# Altium schematic symbol library Mosfet.SchLib: 175 symbols (part 4 of 4)
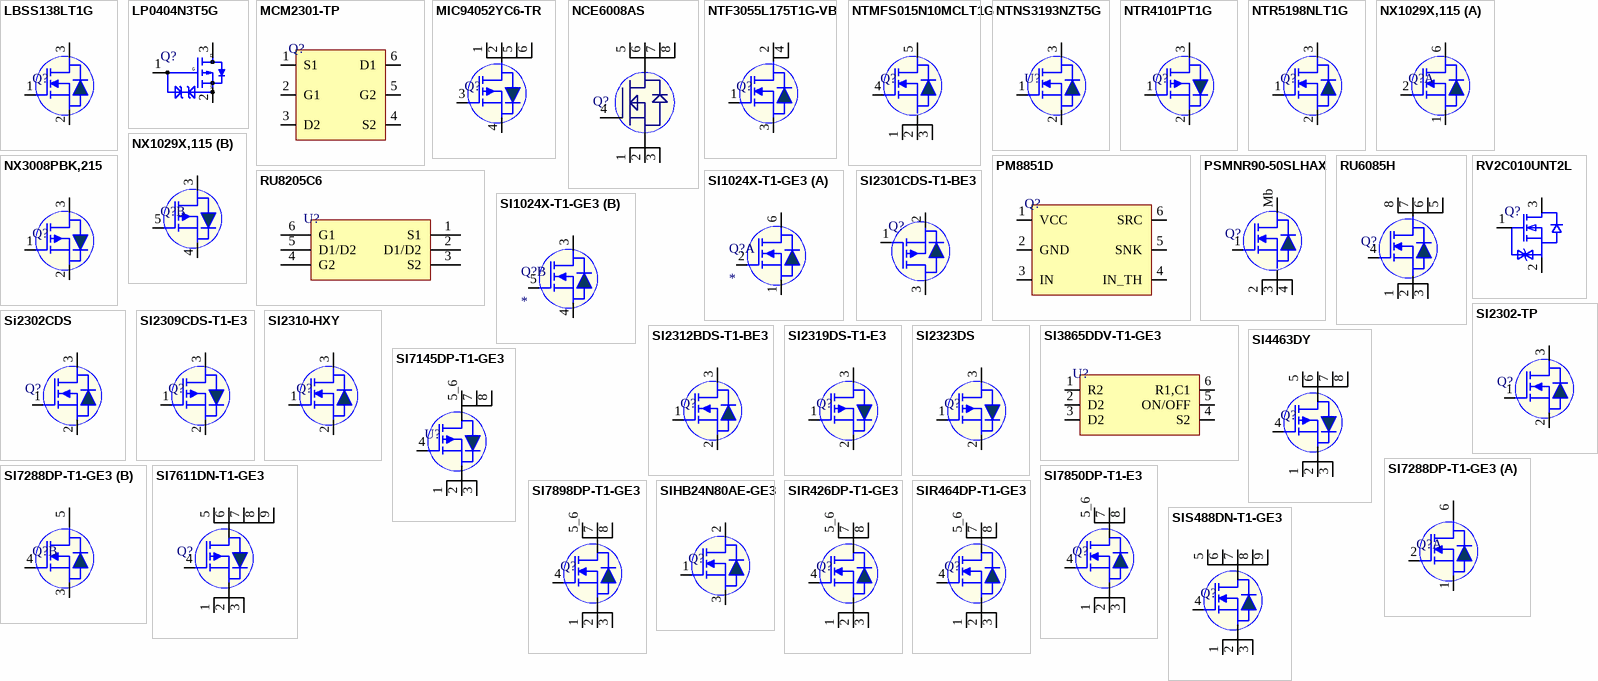
[diagram p7: symbols LBSS138LT1G to SIS488DN-T1-GE3]

## SI3865DDV-T1-GE3
designator U?
IC PWR SWITCH P-CHAN 1:1 6TSOP; Manufacturer: Vishay; Manufacturer Part Number: SI3865DDV-T1-GE3; Output Current: 1A; Number of Outputs: 1; Max Power Dissipation: 830mW; Max Supply Voltage: 12V; Min Supply Voltage: 1.5V; Interface: On/Off; Max Output Current: 2.8A; On-State Resistance: 165mR; Output Configuration: High Side; On-state Resistance-Max: 54mR; Supplier 1: Digi-Key; Stock 1: 54870; Pricing 1: 1=0.58, 10=0.494, 25=0.462, 100=0.3432, 500=0.26796, 1000=0.2178 (USD); Mount: Surface Mount; Case/Package: TSOP; Number of Pins: 6; Weight: 0.000705oz; Min Operating Temperature: -55°C; Max Operating Temperature: 150°C; Packaging: Tape and Reel; Package Quantity: 3000; Power Dissipation: 830mW; Current Rating: 2.8A; Series: TrenchFET®; Rated Current-Max: 2.8A; Length: 3.1mm; Width: 1.7mm; Height: 1mm; Radiation Hardening: No; REACH SVHC: No SVHC; Lead Free: Lead Free; RoHS Compliant: Yes; ComponentLink1URL: http://www.mouser.com/ds/2/427/si3865ddv-256526.pdf?src-supplier=Mouser; ComponentLink1Description: http://www.mouser.com/ds/2/427/si3865ddv-256526.pdf?src-supplier=Mouser; ComponentLink2URL: http://www.vishay.com/docs/67998/si3865ddv.pdf?src-supplier=Avnet; ComponentLink2Description: http://www.vishay.com/docs/67998/si3865ddv.pdf?src-supplier=Avnet; ComponentLink3URL: https://www.verical.com/server-webapp/html/getDatasheet?partID=710254&src-supplier=Verical; ComponentLink3Description: https://www.verical.com/server-webapp/html/getDatasheet?partID=710254&src-supplier=Verical; ComponentLink4URL: https://media.digikey.com/pdf/Data%20Sheets/Vishay%20Siliconix%20PDFs/Si3865DDV.pdf?src-supplier=Digi-Key; ComponentLink4Description: https://media.digikey.com/pdf/Data%20Sheets/Vishay%20Siliconix%20PDFs/Si3865DDV.pdf?src-supplier=Digi-Key; Supplier Part Number 1: SI3865DDV-T1-GE3CT-ND; LCSC Part Number: C141534; Item Type: IC
footprint 6-TSOP_
pins: 1 R2, 2 D2, 3 D2, 4 S2, 5 ON/OFF, 6 R1,C1

## SI4463DY
designator Q?
20V 11.5A 12mΩ@11.5A,4.5V 1W 1.5V@250uA 1PCSPChannel SOIC-8 MOSFETs ROHS; Manufacturer: ON Semiconductor / Fairchild; Manufacturer Part Number: SI4463DY; Rise Time: 15ns; Fall Time: 60ns; Turn-Off Delay Time: 120ns; Continuous Drain Current (ID): -11.5A; Gate to Source Voltage (Vgs): 12V; Drain to Source Resistance: 10mR; Polarity: P-CHANNEL; Power Dissipation: 2.5W; Drain to Source Breakdown Voltage: -20V; Supplier: Farnell; LCSC Part Number: C3279922; RoHS: Yes; Item Type: MOSFETs; Stock: 188616; Pricing: 472=0.62 (GBP); Case/Package: SOIC; Pins: 8; Min Operating Temperature: -55°C; Max Operating Temperature: 150°C; Package Quantity: 2500; Packaging: Tape and Reel; RoHS Compliant: Yes; ComponentLink1URL: http://components.arrow.com/part/dataview/3004105S7561270N7769?src-supplier=Arrow+Electronics; ComponentLink1Description: http://components.arrow.com/part/dataview/3004105S7561270N7769?src-supplier=Arrow+Electronics
footprint SOIC-8
pins: 1 S, 2 S, 3 S, 4 G, 5 D, 6 D, 7 D, 8 D

## SI7145DP-T1-GE3
designator U?
MOSFET P-CH 30V 60A PPAK SO-8; Manufacturer: Vishay Siliconix; Manufacturer Part Number: SI7145DP-T1-GE3; Supplier: Mouser; LCSC Part Number: C144873; RoHS: Yes; Item Type: MOSFET; Stock: 108048; Pricing: 1=1.84, 10=1.58, 50=1.58, 100=1.32, 1000=1.04, 10000=0.956 (USD); ComponentLink1URL: https://datasheet.ciiva.com/4441/si7145dp-223652-4441979.pdf?src-supplier=Mouser; ComponentLink1Description: https://datasheet.ciiva.com/4441/si7145dp-223652-4441979.pdf?src-supplier=Mouser; ComponentLink2URL: https://datasheet.ciiva.com/6367/si7145dp-6367329.pdf?src-supplier=Digikey; ComponentLink2Description: https://datasheet.ciiva.com/6367/si7145dp-6367329.pdf?src-supplier=Digikey; ComponentLink3URL: https://datasheet.ciiva.com/28599/1913296-28599670.pdf?src-supplier=Element14; ComponentLink3Description: https://datasheet.ciiva.com/28599/1913296-28599670.pdf?src-supplier=Element14; ComponentLink4URL: https://datasheet.ciiva.com/22671/1913296-22671737.pdf?src-supplier=Element14; ComponentLink4Description: https://datasheet.ciiva.com/22671/1913296-22671737.pdf?src-supplier=Element14
footprint PowerPAK-SO-8
pins: 1 S, 2 S, 3 S, 4 G, 5_6 D, 7 D, 8 D

## SI7288DP-T1-GE3
designator Q?
MOSFET 2N-CH 40V 20A PPAK SO8; Manufacturer: Vishay Siliconix; Manufacturer Part Number: SI7288DP-T1-GE3; Item Type: MOSFETs; Supplier: Arrow Electronics; LCSC Part Number: C126988; RoHS: Yes; Stock: 18000; Pricing: 3000=0.5368 (USD); ComponentLink1URL: https://datasheet.ciiva.com/1253/si7288dp-1253714.pdf?src-supplier=Newark; ComponentLink1Description: https://datasheet.ciiva.com/1253/si7288dp-1253714.pdf?src-supplier=Newark; ComponentLink2URL: https://datasheet.ciiva.com/4442/si7288dp-244449-4442467.pdf?src-supplier=Mouser; ComponentLink2Description: https://datasheet.ciiva.com/4442/si7288dp-244449-4442467.pdf?src-supplier=Mouser; ComponentLink3URL: https://datasheet.ciiva.com/11161/si7288dp-11161495.pdf?src-supplier=Avnet; ComponentLink3Description: https://datasheet.ciiva.com/11161/si7288dp-11161495.pdf?src-supplier=Avnet; ComponentLink4URL: https://datasheet.ciiva.com/928/si7288dp-928419.pdf?src-supplier=Digikey; ComponentLink4Description: https://datasheet.ciiva.com/928/si7288dp-928419.pdf?src-supplier=Digikey; ComponentLink5URL: https://datasheet.ciiva.com/928/si7288dp-928420.pdf?src-supplier=Digikey; ComponentLink5Description: https://datasheet.ciiva.com/928/si7288dp-928420.pdf?src-supplier=Digikey; ComponentLink6URL: https://datasheet.ciiva.com/928/si7288dp-928421.pdf?src-supplier=Digikey; ComponentLink6Description: https://datasheet.ciiva.com/928/si7288dp-928421.pdf?src-supplier=Digikey; ComponentLink7URL: https://datasheet.ciiva.com/16287/si7288dp-16287085.pdf?src-supplier=Future+Electronics; ComponentLink7Description: https://datasheet.ciiva.com/16287/si7288dp-16287085.pdf?src-supplier=Future+Electronics
footprint PowerPAK® SO-8 Dual
part A pins: 1 S, 2 G, 6 D
part B pins: 3 S, 4 G, 5 D

## SI7611DN-T1-GE3
designator Q?
MOSFET P-CH 40V 18A PPAK1212-8; Manufacturer: Vishay Siliconix; Manufacturer Part Number: SI7611DN-T1-GE3; Rds On Max: 25mR; Input Capacitance: 1.98nF; Nominal Vgs: -3V; Rise Time: 11ns; Drain to Source Voltage (Vdss): -40V; Continuous Drain Current (ID): 9.3A; Max Power Dissipation: 39W; Gate to Source Voltage (Vgs): 20V; Fall Time: 9ns; Turn-Off Delay Time: 30ns; Number of Elements: 1; Power Dissipation: 3.7W; Turn-On Delay Time: 10ns; Polarity: P-CHANNEL; Supplier 1: Avnet; RoHS: Yes; Category: MOSFETs; Pricing 1: 3000=0.96116 (USD); Mount: Surface Mount; Number of Pins: 8; Min Operating Temperature: -50°C; Max Operating Temperature: 150°C; Package Quantity: 3000; Packaging: Tape and Reel; Drain to Source Resistance: 25mR; Threshold Voltage: -3V; Drain to Source Breakdown Voltage: -40V; Number of Channels: 1; On-State Resistance: 25mR; Series: TrenchFET®; Drain-source On Resistance-Max: 25mR; Length: 3.05mm; Width: 3.05mm; Height: 1.04mm; Radiation Hardening: No; Lead Free: Lead Free; RoHS Compliant: Yes; ComponentLink1URL: https://datasheet.ciiva.com/16217/si7611dn-16217425.pdf?src-supplier=Future+Electronics; ComponentLink1Description: https://datasheet.ciiva.com/16217/si7611dn-16217425.pdf?src-supplier=Future+Electronics; ComponentLink2URL: https://datasheet.ciiva.com/22652/1719651-22652413.pdf?src-supplier=Element14; ComponentLink2Description: https://datasheet.ciiva.com/22652/1719651-22652413.pdf?src-supplier=Element14; ComponentLink3URL: https://datasheet.ciiva.com/4441/si7611dn-244617-4441134.pdf?src-supplier=Mouser; ComponentLink3Description: https://datasheet.ciiva.com/4441/si7611dn-244617-4441134.pdf?src-supplier=Mouser; ComponentLink4URL: https://datasheet.ciiva.com/933/si7611dn-933572.pdf?src-supplier=Digi-Key; ComponentLink4Description: https://datasheet.ciiva.com/933/si7611dn-933572.pdf?src-supplier=Digi-Key; ComponentLink5URL: https://datasheet.ciiva.com/933/si7611dn-933573.pdf?src-supplier=Digi-Key; ComponentLink5Description: https://datasheet.ciiva.com/933/si7611dn-933573.pdf?src-supplier=Digi-Key; ComponentLink6URL: https://datasheet.ciiva.com/933/si7611dn-933574.pdf?src-supplier=Digi-Key; ComponentLink6Description: https://datasheet.ciiva.com/933/si7611dn-933574.pdf?src-supplier=Digi-Key; ComponentLink7URL: https://datasheet.ciiva.com/11159/si7611dn-11159816.pdf?src-supplier=Avnet; ComponentLink7Description: https://datasheet.ciiva.com/11159/si7611dn-11159816.pdf?src-supplier=Avnet; ComponentLink8URL: https://datasheet.ciiva.com/22671/si7611dn-22671641.pdf?src-supplier=Element14; ComponentLink8Description: https://datasheet.ciiva.com/22671/si7611dn-22671641.pdf?src-supplier=Element14; Supplier Part Number 1: SI7611DN-T1-GE3; LCSC Part Number: C506599; Item Type: Mosfet
footprint PowerPAK® 1212-8
pins: 1 S, 2 S, 3 S, 4 G, 5 D, 6 D, 7 D, 8 D, 9 D

## SI7850DP-T1-E3
designator Q?
MOSFETs 60V Vds 20V Vgs PowerPAK SO-8; Manufacturer: Vishay Siliconix; Manufacturer Part Number: SI7850DP-T1-E3; Supplier: Mouser; Supplier Part Number: 781-SI7850DP-E3; RoHS: Yes; Item Type: MOSFETs; Stock: 6748; Pricing: 1=1.66, 10=1.41, 50=1.41, 100=1.16, 1000=0.884, 10000=0.806 (USD); ComponentLink1URL: https://datasheet.ciiva.com/5769/71625-5769366.pdf?src-supplier=Farnell; ComponentLink1Description: https://datasheet.ciiva.com/5769/71625-5769366.pdf?src-supplier=Farnell; ComponentLink2URL: https://datasheet.ciiva.com/11161/71625-11161336.pdf?src-supplier=Avnet; ComponentLink2Description: https://datasheet.ciiva.com/11161/71625-11161336.pdf?src-supplier=Avnet; ComponentLink3URL: https://datasheet.ciiva.com/11161/71625-11161551.pdf?src-supplier=Avnet; ComponentLink3Description: https://datasheet.ciiva.com/11161/71625-11161551.pdf?src-supplier=Avnet; ComponentLink4URL: https://datasheet.ciiva.com/28603/1866538-28603533.pdf?src-supplier=Element14; ComponentLink4Description: https://datasheet.ciiva.com/28603/1866538-28603533.pdf?src-supplier=Element14; ComponentLink5URL: https://datasheet.ciiva.com/933/71625-933467.pdf?src-supplier=Digikey; ComponentLink5Description: https://datasheet.ciiva.com/933/71625-933467.pdf?src-supplier=Digikey; ComponentLink6URL: https://datasheet.ciiva.com/933/71625-933468.pdf?src-supplier=Digikey; ComponentLink6Description: https://datasheet.ciiva.com/933/71625-933468.pdf?src-supplier=Digikey; ComponentLink7URL: https://datasheet.ciiva.com/933/71625-933469.pdf?src-supplier=Digikey; ComponentLink7Description: https://datasheet.ciiva.com/933/71625-933469.pdf?src-supplier=Digikey; ComponentLink8URL: https://datasheet.ciiva.com/7710/1866538-7710299.pdf?src-supplier=Element14; ComponentLink8Description: https://datasheet.ciiva.com/7710/1866538-7710299.pdf?src-supplier=Element14
footprint PowerPAK-SO-8
pins: 1 S, 2 S, 3 S, 4 G, 5_6 D, 7 D, 8 D

## SI7898DP-T1-GE3
designator Q?
MOSFET N-CH 150V 3A PPAK SO-8; Manufacturer: Vishay Siliconix; Manufacturer Part Number: SI7898DP-T1-GE3; Item Type: MOSFETs; Supplier: Mouser; LCSC Part Number: C26291; RoHS: Yes; Stock: 9107; Pricing: 1=2.15, 10=1.77, 50=1.77, 100=1.42, 1000=1.02, 10000=0.909 (USD); ComponentLink1URL: https://datasheet.ciiva.com/5769/50990-5769376.pdf?src-supplier=Farnell; ComponentLink1Description: https://datasheet.ciiva.com/5769/50990-5769376.pdf?src-supplier=Farnell; ComponentLink2URL: https://datasheet.ciiva.com/7313/71873-7313920.pdf?src-supplier=Newark; ComponentLink2Description: https://datasheet.ciiva.com/7313/71873-7313920.pdf?src-supplier=Newark; ComponentLink3URL: https://datasheet.ciiva.com/16486/71873-16486686.pdf?src-supplier=Future+Electronics; ComponentLink3Description: https://datasheet.ciiva.com/16486/71873-16486686.pdf?src-supplier=Future+Electronics; ComponentLink4URL: https://datasheet.ciiva.com/6386/71873-6386508.pdf?src-supplier=Digikey; ComponentLink4Description: https://datasheet.ciiva.com/6386/71873-6386508.pdf?src-supplier=Digikey; ComponentLink5URL: https://datasheet.ciiva.com/6386/71873-6386511.pdf?src-supplier=Digikey; ComponentLink5Description: https://datasheet.ciiva.com/6386/71873-6386511.pdf?src-supplier=Digikey; ComponentLink6URL: https://datasheet.ciiva.com/22661/50990-22661750.pdf?src-supplier=Farnell; ComponentLink6Description: https://datasheet.ciiva.com/22661/50990-22661750.pdf?src-supplier=Farnell; ComponentLink7URL: https://datasheet.ciiva.com/11159/71873-11159627.pdf?src-supplier=Avnet; ComponentLink7Description: https://datasheet.ciiva.com/11159/71873-11159627.pdf?src-supplier=Avnet; ComponentLink8URL: https://datasheet.ciiva.com/8059/71873-8059181.pdf?src-supplier=Element14; ComponentLink8Description: https://datasheet.ciiva.com/8059/71873-8059181.pdf?src-supplier=Element14; ComponentLink9URL: https://datasheet.ciiva.com/28671/1911754-28671659.pdf?src-supplier=Element14; ComponentLink9Description: https://datasheet.ciiva.com/28671/1911754-28671659.pdf?src-supplier=Element14; ComponentLink10URL: https://datasheet.ciiva.com/22695/1911754-22695978.pdf?src-supplier=Element14; ComponentLink10Description: https://datasheet.ciiva.com/22695/1911754-22695978.pdf?src-supplier=Element14
footprint PowerPAK-SO-8
pins: 1 S, 2 S, 3 S, 4 G, 5_6 D, 7 D, 8 D

## SIHB24N80AE-GE3
designator Q?
MOSFET N-CH 800V 21A D2PAK; Manufacturer: Vishay; Manufacturer Part Number: SIHB24N80AE-GE3; Supplier: Mouser; LCSC Part Number: C3277647; RoHS: No; Item Type: MOSFET; Stock: 457; Pricing: 1=3.16, 10=2.93, 50=2.71, 100=2.32, 1000=1.66, 10000=1.59 (USD)
footprint TO-263
pins: 1 G, 2 D, 3 S

## SIR426DP-T1-GE3
designator Q?
MOSFET N-CH 40V 30A PPAK SO-8; Manufacturer: Vishay; Manufacturer Part Number: SIR426DP-T1-GE3; Item Type: MOSFETs; Supplier: Mouser; LCSC Part Number: C52893; RoHS: Yes; Stock: 68474; Pricing: 1=1, 10=0.818, 50=0.818, 100=0.637, 1000=0.44, 10000=0.375 (USD); Height: 1.12mm; Lead Free: 5697LeadFree; ComponentLink1URL: https://datasheet.ciiva.com/6387/sir426dp-6387168.pdf?src-supplier=Digikey; ComponentLink1Description: https://datasheet.ciiva.com/6387/sir426dp-6387168.pdf?src-supplier=Digikey; ComponentLink2URL: https://datasheet.ciiva.com/4440/sir426dp-244407-4440641.pdf?src-supplier=Mouser; ComponentLink2Description: https://datasheet.ciiva.com/4440/sir426dp-244407-4440641.pdf?src-supplier=Mouser; ComponentLink3URL: https://datasheet.ciiva.com/28599/1750667-28599683.pdf?src-supplier=Element14; ComponentLink3Description: https://datasheet.ciiva.com/28599/1750667-28599683.pdf?src-supplier=Element14; ComponentLink4URL: https://datasheet.ciiva.com/5774/sir426dp-5774022.pdf?src-supplier=Farnell; ComponentLink4Description: https://datasheet.ciiva.com/5774/sir426dp-5774022.pdf?src-supplier=Farnell; ComponentLink5URL: https://datasheet.ciiva.com/6387/sir426dp-6387166.pdf?src-supplier=Digikey; ComponentLink5Description: https://datasheet.ciiva.com/6387/sir426dp-6387166.pdf?src-supplier=Digikey; ComponentLink6URL: https://datasheet.ciiva.com/11159/sir426dp-11159834.pdf?src-supplier=Avnet; ComponentLink6Description: https://datasheet.ciiva.com/11159/sir426dp-11159834.pdf?src-supplier=Avnet; ComponentLink7URL: https://datasheet.ciiva.com/16486/sir426dp-16486778.pdf?src-supplier=Future+Electronics; ComponentLink7Description: https://datasheet.ciiva.com/16486/sir426dp-16486778.pdf?src-supplier=Future+Electronics
footprint PowerPAK-SO-8
pins: 1 S, 2 S, 3 S, 4 G, 5_6 D, 7 D, 8 D

## SIR464DP-T1-GE3
designator Q?
MOSFET N-CH 30V 50A PPAK SO-8; Manufacturer: Vishay Siliconix; Manufacturer Part Number: SIR464DP-T1-GE3; Item Type: MOSFETs; Supplier: Mouser; LCSC Part Number: C469518; RoHS: Yes; Stock: 4057; Pricing: 1=1.37, 10=1.12, 50=1.12, 100=0.87, 1000=0.601, 10000=0.513 (USD); ComponentLink1URL: https://datasheet.ciiva.com/22707/1758799-22707817.pdf?src-supplier=Element14; ComponentLink1Description: https://datasheet.ciiva.com/22707/1758799-22707817.pdf?src-supplier=Element14; ComponentLink2URL: https://datasheet.ciiva.com/7313/sir464dp-7313971.pdf?src-supplier=Newark; ComponentLink2Description: https://datasheet.ciiva.com/7313/sir464dp-7313971.pdf?src-supplier=Newark; ComponentLink3URL: https://datasheet.ciiva.com/4438/sir464dp-244563-4438539.pdf?src-supplier=Mouser; ComponentLink3Description: https://datasheet.ciiva.com/4438/sir464dp-244563-4438539.pdf?src-supplier=Mouser; ComponentLink4URL: https://datasheet.ciiva.com/8059/sir464dp-8059190.pdf?src-supplier=Element14; ComponentLink4Description: https://datasheet.ciiva.com/8059/sir464dp-8059190.pdf?src-supplier=Element14; ComponentLink5URL: https://datasheet.ciiva.com/11159/sir464dp-11159853.pdf?src-supplier=Avnet; ComponentLink5Description: https://datasheet.ciiva.com/11159/sir464dp-11159853.pdf?src-supplier=Avnet; ComponentLink6URL: https://datasheet.ciiva.com/933/sir464dp-933254.pdf?src-supplier=Digikey; ComponentLink6Description: https://datasheet.ciiva.com/933/sir464dp-933254.pdf?src-supplier=Digikey; ComponentLink7URL: https://datasheet.ciiva.com/933/sir464dp-933255.pdf?src-supplier=Digikey; ComponentLink7Description: https://datasheet.ciiva.com/933/sir464dp-933255.pdf?src-supplier=Digikey; ComponentLink8URL: https://datasheet.ciiva.com/933/sir464dp-933256.pdf?src-supplier=Digikey; ComponentLink8Description: https://datasheet.ciiva.com/933/sir464dp-933256.pdf?src-supplier=Digikey; ComponentLink9URL: https://datasheet.ciiva.com/16287/sir464dp-16287369.pdf?src-supplier=Future+Electronics; ComponentLink9Description: https://datasheet.ciiva.com/16287/sir464dp-16287369.pdf?src-supplier=Future+Electronics
footprint PowerPAK-SO-8
pins: 1 S, 2 S, 3 S, 4 G, 5_6 D, 7 D, 8 D

## SIS488DN-T1-GE3
designator Q?
MOSFET N-CH 40V 40A PPAK1212-8; Manufacturer: Vishay Semiconductors; Manufacturer Part Number: SIS488DN-T1-GE3; Item Type: MOSFETs; Supplier: Arrow Electronics; LCSC Part Number: C511037; RoHS: Yes; Stock: 2575; Pricing: 1=1.0926, 10=1.0325, 25=0.9922, 50=0.9525, 100=0.9137, 250=0.9045, 500=0.8952, 1000=0.8863 (USD); ComponentLink1URL: https://datasheet.ciiva.com/24101/sis488dn-267694-24101036.pdf?src-supplier=Mouser; ComponentLink1Description: https://datasheet.ciiva.com/24101/sis488dn-267694-24101036.pdf?src-supplier=Mouser; ComponentLink2URL: https://datasheet.ciiva.com/29742/sis488dn-29742161.pdf?src-supplier=Digikey; ComponentLink2Description: https://datasheet.ciiva.com/29742/sis488dn-29742161.pdf?src-supplier=Digikey
footprint PowerPAK® 1212-8
pins: 1 S, 2 S, 3 S, 4 G, 5 D, 6 D, 7 D, 8 D, 9 D

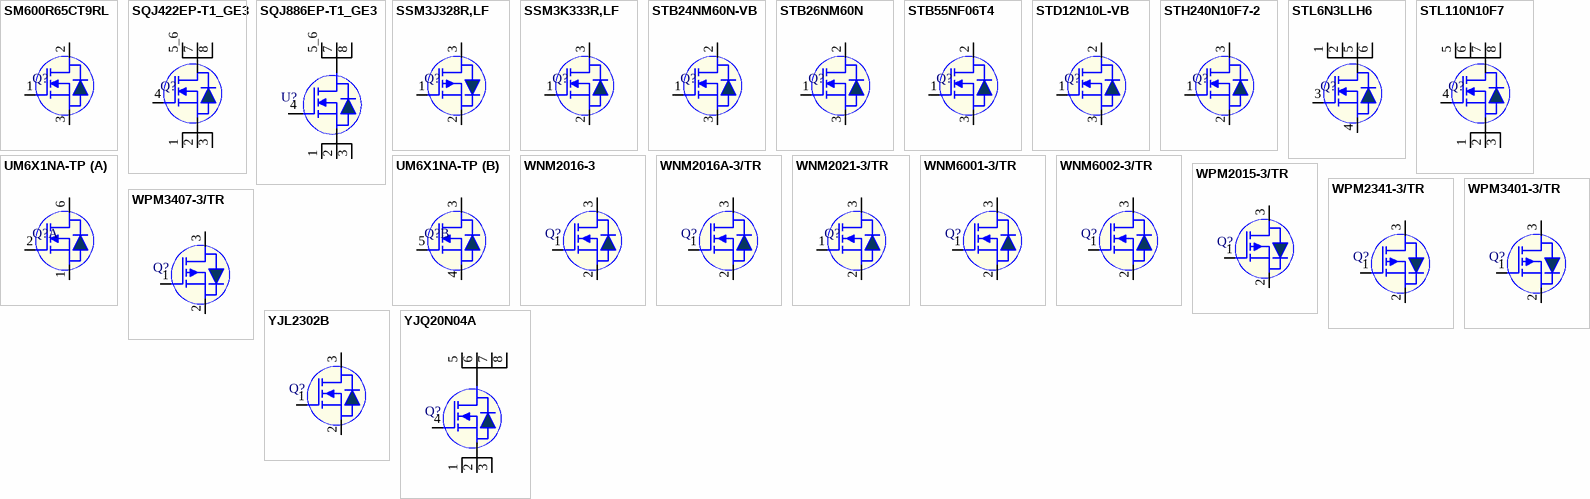
[diagram p4: symbols SM600R65CT9RL to YJQ20N04A]

## SM600R65CT9RL
designator Q?
650V 7A 0.6Ω@10V,3.5A 63W 4V 1 N-channel TO-252-2 MOSFETs ROHS; Manufacturer: SPS; Manufacturer Part Number: SM600R65CT9RL; Item Type: Mosfet; Package: TO-252-2; LCSC Part Number: C509119; ComponentLink1Description: LCSC; ComponentLink1URL: https://www.lcsc.com/product-detail/MOSFETs_SPS-SM600R65CT9RL_C509119.html?s_z=n_TK7P65W
footprint TO-252-2L
pins: 1 G, 2 D, 3 S

## SQJ422EP-T1_GE3
designator Q?
MOSFET N-CH 40V 74A PPAK SO-8; Manufacturer: Vishay; Manufacturer Part Number: SQJ422EP-T1_GE3; Rds On Max: 3.4mR; Input Capacitance: 4.66nF; Rise Time: 10ns; Continuous Drain Current (ID): 75A; Max Power Dissipation: 83W; Threshold Voltage: 2V; Turn-On Delay Time: 13ns; Turn-Off Delay Time: 29ns; Fall Time: 8ns; Gate to Source Voltage (Vgs): 20V; Number of Channels: 1; Polarity: N-CHANNEL; Item Type: IC; Supplier: Mouser; Supplier Part Number: 781-SQJ422EP-T1_GE3; RoHS: Yes; Category: MOSFETs; Stock: 4213; Pricing: 1=1.62, 10=1.34, 50=1.34, 100=1.08, 1000=0.763, 10000=0.68 (USD); Mounting Technology: Surface Mount; Pins: 6; Min Operating Temperature: -55°C; Max Operating Temperature: 175°C; Packaging: Tape and Reel; Package Quantity: 3000; Drain to Source Voltage (Vdss): 40V; Drain to Source Resistance: 3.4mR; Series: TrenchFET®; Reach SVHC Compliant: Unknown; ComponentLink1URL: https://datasheet.ciiva.com/28599/1760635-28599505.pdf?src-supplier=Element14; ComponentLink1Description: https://datasheet.ciiva.com/28599/1760635-28599505.pdf?src-supplier=Element14; ComponentLink2URL: https://datasheet.ciiva.com/29745/sqj422ep-29745736.pdf?src-supplier=Digikey; ComponentLink2Description: https://datasheet.ciiva.com/29745/sqj422ep-29745736.pdf?src-supplier=Digikey; LCSC Part Number: C142542
footprint PowerPAK-SO-8
pins: 1 S, 2 S, 3 S, 4 G, 5_6 D, 7 D, 8 D

## SQJ886EP-T1_GE3
designator U?
MOSFET N-CH 40V 60A PPAK SO-8; Manufacturer: Vishay Siliconix; Manufacturer Part Number: SQJ886EP-T1_GE3; Item Type: IC; Supplier: Mouser; Supplier Part Number: 781-SQJ886EP-T1_GE3; RoHS: Yes; Category: MOSFETs; Stock: 59592; Pricing: 1=1.5, 10=1.24, 50=1.24, 100=0.959, 1000=0.662, 10000=0.565 (USD); ComponentLink1URL: https://datasheet.ciiva.com/28599/1760631-28599527.pdf?src-supplier=Element14; ComponentLink1Description: https://datasheet.ciiva.com/28599/1760631-28599527.pdf?src-supplier=Element14; ComponentLink2URL: https://datasheet.ciiva.com/30021/sqj886ep-30021665.pdf?src-supplier=Avnet; ComponentLink2Description: https://datasheet.ciiva.com/30021/sqj886ep-30021665.pdf?src-supplier=Avnet; LCSC Part Number: C727822
footprint PowerPAK-SO-8
pins: 1 S, 2 S, 3 S, 4 G, 5_6 D, 7 D, 8 D

## SSM3J328R,LF
designator Q?
MOSFET P-CH 20V 6A SOT23F; Manufacturer: Toshiba; Manufacturer Part Number: SSM3J328R,LF; Item Type: MOSFETs; Rds On Max: 29.8mR; Input Capacitance: 840pF; Max Power Dissipation: 1W; Gate to Source Voltage (Vgs): 8V; Turn-Off Delay Time: 107ns; Turn-On Delay Time: 32ns; Number of Channels: 1; Drain to Source Resistance: 47.4mR; Polarity: P-CHANNEL; Supplier: Digikey; LCSC Part Number: C396016; RoHS: Yes; Stock: 582786; Pricing: 1=0.41, 10=0.252, 100=0.1588, 500=0.11846, 1000=0.10542 (USD); Mounting Technology: Surface Mount; Case/Package: SOT-23-3; Min Operating Temperature: -55°C; Max Operating Temperature: 150°C; Continuous Drain Current (ID): 6A; Package Quantity: 3000; Packaging: Tape and Reel; Drain to Source Voltage (Vdss): 20V; Radiation Hardening: No; RoHS Compliant: Yes; ComponentLink1URL: https://datasheet.ciiva.com/11158/ssm3j328r-datasheet-en-20140301-11158652.pdf?src-supplier=Avnet; ComponentLink1Description: https://datasheet.ciiva.com/11158/ssm3j328r-datasheet-en-20140301-11158652.pdf?src-supplier=Avnet; ComponentLink2URL: https://datasheet.ciiva.com/24106/ssm3j328r-datasheet-en-20140301-24106699.pdf?src-supplier=Mouser; ComponentLink2Description: https://datasheet.ciiva.com/24106/ssm3j328r-datasheet-en-20140301-24106699.pdf?src-supplier=Mouser; ComponentLink3URL: https://datasheet.ciiva.com/45425/ssm3j328r-datasheet-en-20140301-45425519.pdf?src-supplier=Digikey; ComponentLink3Description: https://datasheet.ciiva.com/45425/ssm3j328r-datasheet-en-20140301-45425519.pdf?src-supplier=Digikey; ComponentLink4URL: https://datasheet.ciiva.com/45425/ssm3j328r-datasheet-en-20140301-45425813.pdf?src-supplier=Digikey; ComponentLink4Description: https://datasheet.ciiva.com/45425/ssm3j328r-datasheet-en-20140301-45425813.pdf?src-supplier=Digikey
footprint SOT-23F
pins: 1 G, 2 S, 3 D

## SSM3K333R,LF
designator Q?
MOSFET N CH 30V 6A 2-3Z1A; Manufacturer: Toshiba; Manufacturer Part Number: SSM3K333R,LF; Rds On Max: 28mR; Input Capacitance: 436pF; Max Power Dissipation: 1W; Gate to Source Voltage (Vgs): 20V; Drain to Source Resistance: 42mR; Polarity: N-CHANNEL; Supplier: Digikey; Supplier Part Number: SSM3K333RLFCT-ND; RoHS: Yes; Category: MOSFETs; Stock: 53698; Pricing: 1=0.42, 10=0.299, 100=0.1506, 500=0.13348, 1000=0.10388 (USD); Mounting Technology: Surface Mount; Case/Package: SOT-23-3; Continuous Drain Current (ID): 6A; Drain to Source Voltage (Vdss): 30V; Packaging: Tape and Reel; Drain to Source Breakdown Voltage: 30V; Power Dissipation: 1W; Series: -; RoHS Compliant: Yes; ComponentLink1URL: https://datasheet.ciiva.com/6385/ssm3k333r-datasheet-en-20140301-6385191.pdf?src-supplier=Digikey; ComponentLink1Description: https://datasheet.ciiva.com/6385/ssm3k333r-datasheet-en-20140301-6385191.pdf?src-supplier=Digikey
footprint SOT-23F
pins: 1 G, 2 S, 3 D

## STB24NM60N-VB
designator Q?
650V 190mΩ@10V 3.5V 1PCSNChannel TO-263 MOSFETs ROHS; Manufacturer: VBsemi Elec; Manufacturer Part Number: STB24NM60N-VB; Item Type: MOSFET; Package: TO-263; LCSC Part Number: C7569064; ComponentLink1Description: LCSC; ComponentLink1URL: https://www.lcsc.com/product-detail/MOSFETs_VBsemi-Elec-STB24NM60N-VB_C7569064.html
footprint TO-263
pins: 1 G, 2 D, 3 S

## STB26NM60N
designator Q?
MOSFET N-CH 600V 20A D2PAK; Manufacturer: STMicroelectronics; Manufacturer Part Number: STB26NM60N; Item Type: MOSFETs; Supplier: Mouser; LCSC Part Number: C2688646; RoHS: Yes; Stock: 642; Pricing: 1=5.74, 10=3.91, 50=3.91, 100=3.5, 1000=3.49, 10000=3.49 (USD); ComponentLink1URL: https://datasheet.ciiva.com/25625/0900766b810ea17c-25625320.pdf?src-supplier=Rs; ComponentLink1Description: https://datasheet.ciiva.com/25625/0900766b810ea17c-25625320.pdf?src-supplier=Rs; ComponentLink2URL: https://datasheet.ciiva.com/6368/cd00232934-6368742.pdf?src-supplier=Digikey; ComponentLink2Description: https://datasheet.ciiva.com/6368/cd00232934-6368742.pdf?src-supplier=Digikey; ComponentLink3URL: https://datasheet.ciiva.com/6368/cd00232934-6368743.pdf?src-supplier=Digikey; ComponentLink3Description: https://datasheet.ciiva.com/6368/cd00232934-6368743.pdf?src-supplier=Digikey; ComponentLink4URL: https://datasheet.ciiva.com/940/cd00232934-940186.pdf?src-supplier=Digikey; ComponentLink4Description: https://datasheet.ciiva.com/940/cd00232934-940186.pdf?src-supplier=Digikey; ComponentLink5URL: https://datasheet.ciiva.com/16490/cd00232934-16490237.pdf?src-supplier=Future+Electronics; ComponentLink5Description: https://datasheet.ciiva.com/16490/cd00232934-16490237.pdf?src-supplier=Future+Electronics
footprint TO-263
pins: 1 G, 2 D, 3 S

## STB55NF06T4
designator Q?
MOSFET N-CH 60V 50A D2PAK; Manufacturer: STMicroelectronics; Manufacturer Part Number: STB55NF06T4; Item Type: MOSFETs; Supplier: Mouser; Supplier Part Number: 511-STB55NF06; RoHS: Yes; Stock: 5248; Pricing: 1=2.35, 10=1.97, 50=1.97, 100=1.58, 1000=1.1, 10000=1.05 (USD); Voltage Rating (DC): 60V; Current Rating: 50A; Lead Free: 5697LeadFree; ComponentLink1URL: https://datasheet.ciiva.com/4441/cd00002311-107743-4441381.pdf?src-supplier=Mouser; ComponentLink1Description: https://datasheet.ciiva.com/4441/cd00002311-107743-4441381.pdf?src-supplier=Mouser; ComponentLink2URL: https://datasheet.ciiva.com/17097/stb55nf06t4-17097567.pdf?src-supplier=Allied+Electronics; ComponentLink2Description: https://datasheet.ciiva.com/17097/stb55nf06t4-17097567.pdf?src-supplier=Allied+Electronics; ComponentLink3URL: https://datasheet.ciiva.com/16383/cd00002311-16383630.pdf?src-supplier=Future+Electronics; ComponentLink3Description: https://datasheet.ciiva.com/16383/cd00002311-16383630.pdf?src-supplier=Future+Electronics; ComponentLink4URL: https://datasheet.ciiva.com/938/cd00002311-938375.pdf?src-supplier=Digikey; ComponentLink4Description: https://datasheet.ciiva.com/938/cd00002311-938375.pdf?src-supplier=Digikey; ComponentLink5URL: https://datasheet.ciiva.com/938/cd00002311-938376.pdf?src-supplier=Digikey; ComponentLink5Description: https://datasheet.ciiva.com/938/cd00002311-938376.pdf?src-supplier=Digikey; LCSC Part Number: C472532
footprint STB55NF06T4
pins: 1 G, 2 D, 3 S

## STD12N10L-VB
designator Q?
100V 15A 96W 114mΩ@10V,3A 3.5V@250uA 1 N-Channel TO-252 MOSFETs ROHS; Manufacturer: VBsemi; Manufacturer Part Number: STD12N10L-VB; Package: TO-252; LCSC Part Number: C5179533; Item Type: MOSFETs; ComponentLink1Description: LCSC; ComponentLink1URL: https://www.lcsc.com/product-detail/MOSFETs_VBsemi-Elec-STD12N10L-VB_C5179533.html
footprint TO-252-2L
pins: 1 G, 2 D, 3 S

## STH240N10F7-2
designator Q?
MOSFET N-CH 100V 180A H2PAK-2; Manufacturer: STMicroelectronics; Manufacturer Part Number: STH240N10F7-2; Item Type: MOSFETs; Supplier: Mouser; LCSC Part Number: C3278109; RoHS: Yes; Stock: 947; Pricing: 1=5.25, 10=5.25, 50=5.25, 100=5.25, 1000=1.89, 10000=1.89 (USD); ComponentLink1URL: http://www.mouser.com/ds/2/389/sth240n10f7-2-956094.pdf?src-supplier=Mouser; ComponentLink1Description: http://www.mouser.com/ds/2/389/sth240n10f7-2-956094.pdf?src-supplier=Mouser; ComponentLink2URL: http://www.st.com/content/ccc/resource/technical/document/datasheet/c0/bb/6e/12/19/24/43/41/DM00111318.pdf/files/DM00111318.pdf/jcr:content/translations/en.DM00111318.pdf?src-supplier=Digikey; ComponentLink2Description: http://www.st.com/content/ccc/resource/technical/document/datasheet/c0/bb/6e/12/19/24/43/41/DM00111318.pdf/files/DM00111318.pdf/jcr:content/translations/en.DM00111318.pdf?src-supplier=Digikey
footprint H2PAK-2
pins: 1 G, 2 S, 3 D

## STL6N3LLH6
designator Q?
MOSFET N-CH 30V POWERFLAT; Manufacturer: STMicroelectronics; Manufacturer Part Number: STL6N3LLH6; Item Type: MOSFETs; Rds On Max: 25mR; Input Capacitance: 283pF; Rise Time: 11.2ns; Continuous Drain Current (ID): 6A; Max Power Dissipation: 2.4W; Drain to Source Resistance: 40mR; Gate to Source Voltage (Vgs): 20V; Fall Time: 5.4ns; Turn-Off Delay Time: 9.4ns; Turn-On Delay Time: 4.8ns; Polarity: N-CHANNEL; Supplier: Mouser; LCSC Part Number: C2969890; RoHS: Yes; Stock: 6401; Pricing: 1=0.95, 10=0.663, 50=0.663, 100=0.447, 1000=0.32, 10000=0.247 (USD); Mounting Technology: Surface Mount; Pins: 6; Min Operating Temperature: -55°C; Max Operating Temperature: 150°C; Package Quantity: 1; Packaging: Tape and Reel; Drain to Source Voltage (Vdss): 30V; Drain to Source Breakdown Voltage: 30V; Series: STripFET™ VI, DeepGATE™; Length: 2.1mm; Width: 2.1mm; Height: 0.75mm; Radiation Hardening: No; RoHS Compliant: Yes; ComponentLink1URL: https://datasheet.ciiva.com/15043/dm00055974-15043766.pdf?src-supplier=Digikey; ComponentLink1Description: https://datasheet.ciiva.com/15043/dm00055974-15043766.pdf?src-supplier=Digikey; ComponentLink2URL: https://datasheet.ciiva.com/16385/dm00055974-16385751.pdf?src-supplier=Mouser; ComponentLink2Description: https://datasheet.ciiva.com/16385/dm00055974-16385751.pdf?src-supplier=Mouser; ComponentLink3URL: https://datasheet.ciiva.com/15043/dm00055974-15043767.pdf?src-supplier=Digikey; ComponentLink3Description: https://datasheet.ciiva.com/15043/dm00055974-15043767.pdf?src-supplier=Digikey; ComponentLink4URL: https://datasheet.ciiva.com/15043/dm00055974-15043768.pdf?src-supplier=Digikey; ComponentLink4Description: https://datasheet.ciiva.com/15043/dm00055974-15043768.pdf?src-supplier=Digikey; ComponentLink5URL: https://datasheet.ciiva.com/30022/dm00055974-30022010.pdf?src-supplier=Avnet; ComponentLink5Description: https://datasheet.ciiva.com/30022/dm00055974-30022010.pdf?src-supplier=Avnet
footprint PowerFlat™ (2x2)
pins: 1 D, 2 D, 3 G, 4 S, 5 D, 6 D

## STL110N10F7
designator Q?
MOSFET N-CH 100V 107A POWERFLAT; Manufacturer: STMicroelectronics; Manufacturer Part Number: STL110N10F7; Item Type: MOSFETs; Supplier: Digikey; LCSC Part Number: C672185; RoHS: Yes; Stock: 2712; Pricing: 1=3.29, 10=2.144, 100=1.4894, 500=1.20992, 1000=1.12011 (USD); Lead Free: 5697LeadFree; ComponentLink1URL: https://datasheet.ciiva.com/24009/dm00071579-24009914.pdf?src-supplier=Mouser; ComponentLink1Description: https://datasheet.ciiva.com/24009/dm00071579-24009914.pdf?src-supplier=Mouser; ComponentLink2URL: https://datasheet.ciiva.com/18566/dm00071579-18566747.pdf?src-supplier=Digikey; ComponentLink2Description: https://datasheet.ciiva.com/18566/dm00071579-18566747.pdf?src-supplier=Digikey
footprint PowerFLAT-8(5x6)
pins: 1 S, 2 S, 3 S, 4 G, 5 D, 6 D, 7 D, 8 D

## UM6X1NA-TP
designator Q?
MOSFET 2N-CH 30V 0.5A SOT563; Manufacturer: MCC; Manufacturer Part Number: UM6X1NA-TP; Supplier: Digikey; Supplier Part Number: 353-UM6X1NA-TPCT-ND; RoHS: No; Item Type: Mosfet; Stock: 4780; Pricing: 1=0.29, 10=0.203, 100=0.1284, 500=0.08108, 1000=0.06082 (USD)
footprint SOT-563
part A pins: 1 S1, 2 G1, 6 D1
part B pins: 3 D2, 4 S4, 5 G2

## WNM2016-3
designator Q?
SOT-23-3 MOSFETs ROHS; Manufacturer: VBsemi Elec; Manufacturer Part Number: WNM2016-3; Item Type: Mosfet; Footprint: SOT-23-3; ComponentLink1Description: LCSC; ComponentLink1URL: https://lcsc.com/product-detail/MOSFETs_VBsemi-Elec-WNM2016-3_C710113.html; LCSC Part Number: C710113
footprint SOT-23 (TRANS NPN 40V 0.6A SOT23)
pins: 1 G, 2 S, 3 D

## WNM2016A-3/TR
designator Q?
Single N-Channel, 20V, 4.7A, Power MOSFET; Manufacturer: WILLSEMI; Manufacturer Part Number: WNM2016A-3/TR; Footprint: SOT-23-3; ComponentLink1Description: LCSC; ComponentLink1URL: https://www.lcsc.com/product-detail/MOSFETs_WILLSEMI-Will-Semicon-WNM2016A-3-TR_C601105.html; LCSC Part Number: C601105; Item Type: Mosfet
footprint sot-23
pins: 1 G, 2 S, 3 D

## WNM2021-3/TR
designator Q?
20V 820mA 310mW 310mΩ@4.5V,550mA 850mV@250uA 1PCSNChannel SOT-323 MOSFETs ROHS; Manufacturer: WILLSEMI; Manufacturer Part Number: WNM2021-3/TR; Item Type: MOSFET; Package: SOT-323; LCSC Part Number: C239556; ComponentLink1Description: LCSC; ComponentLink1URL: https://www.lcsc.com/product-detail/MOSFETs_WILLSEMI-Will-Semicon-WNM2021-3-TR_C239556.html
footprint SOT-323
pins: 1 G, 2 S, 3 D

## WNM6001-3/TR
designator Q?
60V 500mA 690mW 2Ω@10V,500mA 2V@250uA N Channel SOT-23 MOSFETs ROHS; Manufacturer: WILLSEMI; Manufacturer Part Number: WNM6001-3/TR; Item Type: Mosfet; ComponentLink1Description: LCSC; ComponentLink1URL: https://www.lcsc.com/product-detail/MOSFETs_WILLSEMI-Will-Semicon-WNM6001-3-TR_C239589.html; Footprint: SOT-23; LCSC Part Number: C239589
footprint SOT-23 (TRANS NPN 40V 0.6A SOT23)
pins: 1 G, 2 S, 3 D

## WNM6002-3/TR
designator Q?
60V 300mA 2Ω@10V,370mA 370mW 2V@250uA N Channel SOT-323 MOSFETs ROHS; Manufacturer: WILLSEMI; Manufacturer Part Number: WNM6002-3/TR; Item Type: Mosfet; ComponentLink1Description: LCSC; ComponentLink1URL: https://www.lcsc.com/product-detail/MOSFETs_WILLSEMI-Will-Semicon-WNM6002-3-TR_C501342.html; Package: SOT-323; LCSC Part Number: C501342
footprint SOT_323
pins: 1 G, 2 S, 3 D

## WPM2015-3/TR
designator Q?
20V 2.2A 800mW 110mΩ@4.5V,2.7A 810mV@250uA P Channel SOT-23 MOSFETs ROHS; Manufacturer: WILLSEMI; Manufacturer Part Number: WPM2015-3/TR; Item Type: Mosfet; Package: SOT-23; LCSC Part Number: C213159; ComponentLink1Description: LCSC; ComponentLink1URL: https://www.lcsc.com/product-detail/MOSFETs_WILLSEMI-Will-Semicon-WPM2015-3-TR_C213159.html
footprint Sot-23 (TRANS NPN 40V 0.6A SOT23)
pins: 1 G, 2 S, 3 D

## WPM2341-3/TR
designator Q?
20V 3.5A 750mW 61mΩ@4.5V,3.3A 1V@250uA 1PCSPChannel SOT-23 MOSFETs ROHS; Manufacturer: WILLSEMI; Manufacturer Part Number: WPM2341-3/TR; Item Type: Mosfet; Package: SOT-23; LCSC Part Number: C167138; ComponentLink1Description: LCSC; ComponentLink1URL: https://www.lcsc.com/product-detail/MOSFETs_WILLSEMI-Will-Semicon-WPM2341-3-TR_C167138.html
footprint Sot-23 (TRANS NPN 40V 0.6A SOT23)
pins: 1 G, 2 S, 3 D

## WPM3401-3/TR
designator Q?
30V 4.6A 38mΩ@10V,4.3A 1.3W 1V@250uA 90pF@15V P Channel 1.25nF@15V 24.8nC@10V +150℃@(Tj) SOT-23-3L MOSFETs ROHS; Manufacturer: WILLSEMI; Manufacturer Part Number: WPM3401-3/TR; Item Type: Mosfet; Footprint: SOT-23-3L; ComponentLink1Description: LCSC; ComponentLink1URL: https://www.lcsc.com/product-detail/MOSFETs_WILLSEMI-Will-Semicon-WPM3401-3-TR_C506235.html; LCSC Part Number: C506235
footprint SOT-23-3L_
pins: 1 G, 2 S, 3 D

## WPM3407-3/TR
designator Q?
30V 3.7A 46mΩ@10V,4.4A 1W 3V@250uA P Channel SOT-23(SOT-23-3) MOSFETs ROHS; Manufacturer Part Number: WPM3407-3/TR; Manufacturer: WILLSEMI; Item Type: Mosfet; Package: SOT-23; LCSC Part Number: C167139; ComponentLink1Description: LCSC; ComponentLink1URL: https://www.lcsc.com/product-detail/MOSFETs_WILLSEMI-Will-Semicon-WPM3407-3-TR_C167139.html
footprint Sot-23 (TRANS NPN 40V 0.6A SOT23)
pins: 1 G, 2 S, 3 D

## YJL2302B
designator Q?
20V 3A 40mΩ@4.5V,3A 700mW 780mV@250uA 29pF@10V N Channel 280pF@10V 2.9nC@4.5V -55℃~+150℃@(Tj) SOT-23-3L MOSFETs ROHS; Manufacturer: Yangzhou Yangjie Elec Tech; Manufacturer Part Number: YJL2302B; Item Type: Mosfet; Package: SOT-23-3L; LCSC Part Number: C699316; ComponentLink1Description: LCSC; ComponentLink1URL: https://lcsc.com/product-detail/MOSFETs_Yangzhou-Yangjie-Elec-Tech-YJL2302B_C699316.html
footprint SOT-23-3L_
pins: 1 G, 2 S, 3 D

## YJQ20N04A
designator Q?
DFN(3.3x3.3) N 40V 20A  Transistor; Manufacturer: Yangzhou Yangjie Elec Tech; Manufacturer Part Number: YJQ20N04A; ComponentLink1Description: LCSC; ComponentLink1URL: https://www.lcsc.com/product-detail/MOSFETs_Yangzhou-Yangjie-Elec-Tech-YJQ20N04A_C919577.html; Package: DFN(3.3x3.3); LCSC Part Number: C919577; Item Type: Transistor
footprint DFN (3.3X3.3)
pins: 1 S, 2 S, 3 S, 4 G, 5 D, 6 D, 7 D, 8 D